# Altium footprint library amirlib.PcbLib: 456 footprints (part 4 of 29)
Each footprint in its own frame and in the unit in brackets; x right, y up, seen from the top. Pads: shape width x height; smd on the part's side, far side on the other; paste and mask are expansions set on the pad; w line width, h text height; cw(c..) or ccw(c..) is an arc to the next point about the centre after c.
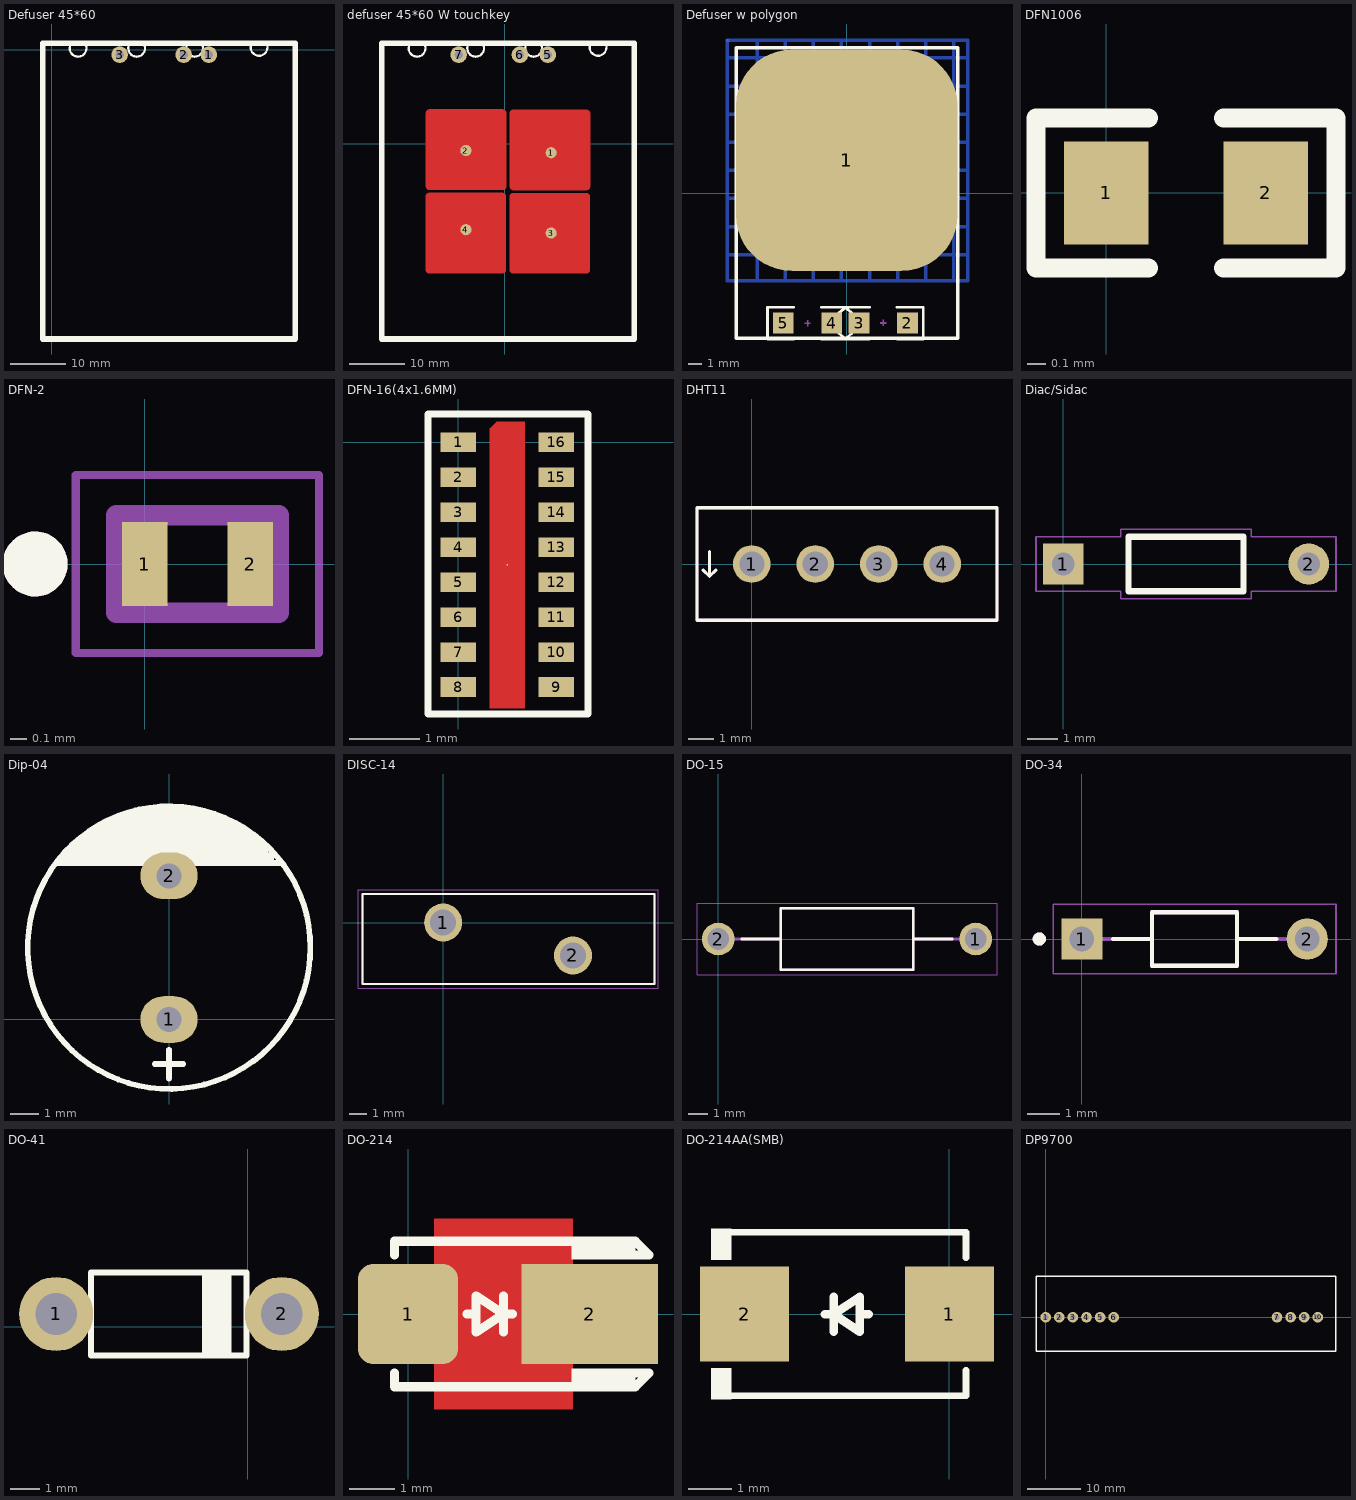
[diagram p3: the footprints below, top view; thin cyan lines are the x and y axes]

## Defuser 45*60 [mm]
pads (3):
  round 3 hole 1.5 square mask+0: 1(28.2,-0.9) 2(23.675,-0.9) 3(12.2,-0.9)
Top Overlay:
  lines w0.4: 3.29,0.6 ccw(c4.745,0.236) 6.2,0.6 ; 13.79,0.6 ccw(c15.245,0.236) 16.7,0.6 ; 24.19,0.6 ccw(c25.645,0.236) 27.1,0.6 ; 35.745,0.764 ccw(c37.2,0.4) 38.655,0.764
  lines w1: -1.6,1.1 -1.6,-51.9 43.4,-51.9 ; -1.3,1.1 43.7,1.1 43.7,-51.9
3D body: height 3, standoff 0, extent -1.951,-52.228 44.35,1.775

## defuser 45*60 W touchkey [mm]
pads (7):
  round 2 smd mask+0: 1(8.3,-1.6) 2(-7,-1.2) 3(8.3,-16) 4(-7,-15.4)
  round 3 hole 1.5 square mask+0: 5(7.7,16) 6(2.7,16) 7(-8.3,16)
Top Layer:
  region: 14.9,-9.183 1.133,-9.183 1.133,-22.899 14.9,-22.899
  region: 14.944,5.772 1.178,5.772 1.178,-7.944 14.944,-7.944
  region: -0.144,-9.138 -13.911,-9.138 -13.911,-22.854 -0.144,-22.854
  region: -0.1,5.816 -13.867,5.816 -13.867,-7.9 -0.1,-7.9
  lines w0.5: -14.017,-22.502 ccw(c-13.517,-22.502) -13.517,-23.002 -0.517,-23.002 ccw(c-0.517,-22.502) -0.017,-22.502 -0.017,-9.502 ccw(c-0.517,-9.502) -0.517,-9.002 -13.517,-9.002 ccw(c-13.517,-9.502) -14.017,-9.502 -14.017,-22.502 ; -13.973,-7.547 ccw(c-13.473,-7.547) -13.473,-8.047 -0.473,-8.047 ccw(c-0.473,-7.547) 0.027,-7.547 0.027,5.453 ccw(c-0.473,5.453) -0.473,5.953 -13.473,5.953 ccw(c-13.473,5.453) -13.973,5.453 -13.973,-7.547 ; 1.027,-22.547 ccw(c1.527,-22.547) 1.527,-23.047 14.527,-23.047 ccw(c14.527,-22.547) 15.027,-22.547 15.027,-9.547 ccw(c14.527,-9.547) 14.527,-9.047 1.527,-9.047 ccw(c1.527,-9.547) 1.027,-9.547 1.027,-22.547 ; 1.072,-7.591 ccw(c1.572,-7.591) 1.572,-8.091 14.572,-8.091 ccw(c14.572,-7.591) 15.072,-7.591 15.072,5.409 ccw(c14.572,5.409) 14.572,5.909 1.572,5.909 ccw(c1.572,5.409) 1.072,5.409 1.072,-7.591
Top Overlay:
  lines w0.4: -17.21,17.5 ccw(c-15.755,17.136) -14.3,17.5 ; -6.71,17.5 ccw(c-5.255,17.136) -3.8,17.5 ; 3.69,17.5 ccw(c5.145,17.136) 6.6,17.5 ; 15.245,17.664 ccw(c16.7,17.3) 18.155,17.664
  lines w1: -22.1,18 -22.1,-35 22.9,-35 ; -21.8,18 23.2,18 23.2,-35
3D body: height 3, standoff 0, extent -22.451,-35.328 23.85,18.675

## Defuser w polygon [mm]
pads (6):
  rrect50% 16x16 smd: 1(-0.012,2.375)
  rect 1.5x1.5 smd: 2(4.375,-9.4) 3(0.875,-9.4) 4(-1.1,-9.4) 5(-4.6,-9.4)
  round 0.2 smd far side mask+0: 6(-8.64,11.046)
Bottom Layer:
  lines w0.254: -8.64,-4.448 8.749,-4.448 ; -8.64,-2.416 8.749,-2.416 ; -8.64,-0.384 8.749,-0.384 ; -8.64,1.648 8.749,1.648 ; -8.64,3.68 8.749,3.68 ; -8.64,5.712 8.749,5.712 ; -8.64,7.744 8.749,7.744 ; -8.64,9.776 8.749,9.776 ; -6.491,-6.342 -6.491,11.046 ; -4.459,-6.342 -4.459,11.046 ; -2.427,-6.342 -2.427,11.046 ; -0.395,-6.342 -0.395,11.046 ; 1.637,-6.342 1.637,11.046 ; 3.669,-6.342 3.669,11.046 ; 5.701,-6.342 5.701,11.046 ; 7.733,-6.342 7.733,11.046 ; -8.64,-6.342 8.749,-6.342 8.749,11.046 -8.64,11.046 -8.64,-6.342
Top Overlay:
  lines w0.2: -3.85,-10.55 -5.75,-10.55 -5.75,-8.25 -3.85,-8.25 ; -1.85,-10.55 -0.15,-10.55 0.35,-10.15 0.35,-8.65 -0.15,-8.25 -1.85,-8.25 ; 1.625,-10.55 -0.075,-10.55 -0.575,-10.15 -0.575,-8.65 -0.075,-8.25 1.625,-8.25 ; 3.625,-10.55 5.525,-10.55 5.525,-8.25 3.625,-8.25
  lines w0.254: -8,10.5 -8,10.5 ; -8,10.5 -8,-10.5 8,-10.5 8,10.5 -8,10.5
Mechanical 1:
  lines w0.1: -3.05,-9.425 -2.65,-9.425 ; -3.05,-9.4 -2.65,-9.4 ; -2.85,-9.625 -2.85,-9.225 ; -2.85,-9.6 -2.85,-9.2 ; 2.425,-9.4 2.825,-9.4 ; 2.425,-9.375 2.825,-9.375 ; 2.625,-9.6 2.625,-9.2 ; 2.625,-9.575 2.625,-9.175
3D body "User Library-led_1206.STEP": height 1.1, standoff 0, extent -4.46,-10.2 -1.24,-8.6
3D body "SW3dPS-LED_SMD_SML010L_Red.STEP": height 1.36, standoff 0.01, extent 0.975,-10.088 4.275,-8.638

## DFN1006 [mm]
pads (2):
  rect 0.45x0.55 smd paste+0 mask+0.051: 1(0,0) 2(0.85,0)
Top Overlay:
  lines w0.102: 0.225,-0.4 -0.375,-0.4 -0.375,0.2 -0.375,0.4 0.225,0.4 ; 0.625,-0.4 1.225,-0.4 1.225,0.2 1.225,0.4 0.625,0.4
Mechanical 15:
  lines w0.003: 0.571,0.441 0.571,0.442
3D body "BAT54LP-7B.STEP": height 0.53, standoff 0, extent -0.056,-0.3 0.944,0.3

## DFN-2 [mm]
pads (2):
  rect 0.28x0.52 smd: 1(0,0) 2(0.65,0)
Top Overlay:
  circle w0.2: c-0.675,0 r0.1
Mechanical 13:
  circle w0.2: c-0.675,0 r0.1
  lines w0.127: -0.175,-0.3 -0.175,0.3 0.825,0.3 0.825,-0.3 -0.175,-0.3
Mechanical 15:
  lines w0.05: -0.425,-0.55 -0.425,0.55 1.075,0.55 1.075,-0.55 -0.425,-0.55
3D body "step_temp.STEP": height 0.4, standoff 0, extent -0.181,-0.312 0.831,0.312

## DFN-16(4x1.6MM) [mm]
pads (17):
  rect 0.51x0.28 smd paste+0 mask+0.102: 1(0,0) 2(0,-0.5) 3(0,-1) 4(0,-1.5) 5(0,-2) 6(0,-2.5) 7(0,-3) 8(0,-3.5) 9(1.4,-3.5) 10(1.4,-3) 11(1.4,-2.5) 12(1.4,-2) 13(1.4,-1.5) 14(1.4,-1) 15(1.4,-0.5) 16(1.4,0)
  round 0.025 smd: 17(0.7,-1.753)
Top Layer:
  region: 0.45,-3.803 0.95,-3.803 0.95,0.297 0.55,0.297 0.45,0.197
Top Overlay:
  lines w0.1: -0.432,-3.886 1.854,-3.886 1.854,0.406 -0.432,0.406 -0.432,-3.886
3D body "DFN16, 4x1.6, 0.5P.step": height 0.6, standoff 0, extent -0.139,-3.753 1.511,0.247

## DHT11 [mm]
pads (4):
  round 1.508 hole 1: 1(0,0) 2(2.54,0) 3(5.08,0) 4(7.62,0)
Top Overlay:
  lines w0.127: -1.69,0.5 -1.69,-0.5 ; -1.44,-0.25 -1.69,-0.5 ; -1.69,-0.5 -1.94,-0.25 -1.69,-0.5 ; -2.19,-2.25 9.81,-2.25 9.81,2.25 -2.19,2.25 -2.19,-2.25
Mechanical 13:
  lines w0.127: -2.19,-2.25 9.81,-2.25 9.81,2.25 -2.19,2.25 -2.19,-2.25
Mechanical 15:
  lines w0.127: -2.19,-2.25 9.81,-2.25 9.81,2.25 -2.19,2.25 -2.19,-2.25
3D body "step_temp.STEP": height 16, standoff -7.7, extent -2.44,-3 10.06,3

## Diac/Sidac [mm]
pads (2):
  rect 1.35x1.35 hole 0.75: 1(0,0)
  round 1.35 hole 0.75: 2(8.1,0)
Top Overlay:
  lines w0.2: 2.15,-0.9 5.95,-0.9 5.95,0.9 2.15,0.9 2.15,-0.9
Mechanical 15:
  lines w0.05: -0.9,-0.9 -0.9,0.9 1.9,0.9 1.9,1.15 6.2,1.15 6.2,0.9 9,0.9 9,-0.9 6.2,-0.9 6.2,-1.15 1.9,-1.15 1.9,-0.9 -0.9,-0.9
3D body "CircuitWorks-RESISTOR 7_62MM DIP.STEP": height 2, standoff -2, extent 0.014,-0.965 8.114,1.035

## Dip-04 [mil]
pads (2):
  oval 80x65 hole 35: 1(0,0) 2(0,200)
Top Overlay:
  circle w7.87: c0,100 r196.85
  region: -74.62,277.83 -74.62,217.98 71.44,217.98 71.44,277.83
  lines w7.87: -155.72,217.98 153.72,217.98 ; -146.67,217.98 -146.67,227.83 ; -141.16,217.98 -141.16,234.13 ; -134.46,217.98 -134.46,240.82 ; -127.38,217.98 -127.38,247.12 ; -119.9,217.98 -119.9,252.63 ; -112.42,217.98 -112.42,258.14 ; -105.72,217.98 -105.33,263.26 ; -98.64,217.98 -98.64,266.8 ; -91.94,217.98 -91.94,270.35 ; -84.86,217.98 -84.86,273.89 ; -77.77,217.98 -77.77,275.07 ; -74.62,277.83 71.44,277.83 ; -63,283.91 62,283.91 ; -47,290.91 46,290.91 ; -20,-62.13 20,-62.13 ; 0,-82.13 0,-42.13 ; 73.02,217.98 73.02,277.83 ; 80.5,217.98 80.5,274.68 ; 87.19,217.98 87.19,271.53 ; 93.88,217.98 93.88,267.98 ; 100.57,217.98 100.57,264.05 ; 107.66,217.98 107.66,259.72 ; 114.35,217.98 114.35,255.39 ; 121.05,217.98 121.05,250.27 ; 127.35,244.76 127.74,244.36 127.74,217.98 ; 134.43,238.46 134.83,238.06 134.83,217.98 ; 142.31,217.98 142.31,230.98
3D body "SW3dPS-Cap electro 10x12.5x5.0mm.STEP": height 402.57, standoff 6.87, extent -631.89,-104.94 17.83,290.38

## DISC-14 [mm]
pads (2):
  round 2.2 hole 1.5: 1(0,0) 2(7.5,-1.9)
Top Overlay:
  lines w0.127: -4.674,-3.55 -4.674,1.65 12.217,1.65 12.217,-3.55 -4.674,-3.55
Mechanical 13:
  lines w0.127: -4.674,-3.55 12.217,-3.55 12.217,1.65 -4.674,1.65 -4.674,-3.55
Mechanical 15:
  lines w0.05: -4.928,-3.8 12.421,-3.8 12.421,1.9 -4.928,1.9 -4.928,-3.8
3D body "step_temp.STEP": height 20, standoff -20, extent -4.5,-3.15 12,1.25

## DO-15 [mm]
pads (2):
  round 1.65 hole 1.1: 1(13,0) 2(0,0)
Top Overlay:
  lines w0.127: 1.18,0 3.15,0 ; 11.82,0 9.85,0 ; 3.15,0 3.15,-1.55 9.85,-1.55 9.85,0 ; 3.15,0 3.15,1.55 9.85,1.55 9.85,0
Mechanical 13:
  lines w0.127: 0,0 3.15,0 ; 13,0 9.85,0 ; 3.15,0 3.15,-1.55 9.85,-1.55 9.85,0 ; 3.15,0 3.15,1.55 9.85,1.55 9.85,0
Mechanical 15:
  lines w0.05: -1.075,-1.8 14.075,-1.8 14.075,1.8 -1.075,1.8 -1.075,-1.8
3D body "step_temp.STEP": height 3.6, standoff -20.45, extent -0.393,-1.8 13.393,1.8

## DO-34 [mm]
pads (2):
  rect 1.258x1.258 / inner round 1.258 / far side rect 1.258x1.258 hole 0.75: 1(0,0)
  round 1.258 hole 0.75: 2(6.89,0)
Top Overlay:
  circle w0.2: c-1.305,0 r0.1
  lines w0.127: 0.949,0 2.145,0 ; 5.941,0 4.745,0 ; 2.145,0 2.145,0.817 4.745,0.817 4.745,0 ; 2.145,0 2.145,-0.817 4.745,-0.817 4.745,0
Mechanical 13:
  circle w0.2: c-1.305,0 r0.1
  lines w0.127: 0,0 2.145,0 ; 6.89,0 4.745,0 ; 2.145,0 2.145,0.817 4.745,0.817 4.745,0 ; 2.145,0 2.145,-0.817 4.745,-0.817 4.745,0
Mechanical 15:
  lines w0.05: -0.879,-1.068 -0.879,1.068 7.769,1.068 7.769,-1.068 -0.879,-1.068
3D body "MTZJ15SA R0G.STEP": height 2, standoff -27.3, extent -0.258,-0.993 7.058,0.993

## DO-41 [mm]
pads (2):
  round 2.5 hole 1.4: 1(-6.47,0.425) 2(1.15,0.425)
Top Overlay:
  rectangle: -1.54,-0.972 -0.552,1.822
  lines w0.2: -5.29,-0.972 -5.29,1.822 -0.04,1.822 -0.04,-0.972 -5.29,-0.972
3D body "1N4007.STEP": height 3.33, standoff -1, extent -6.876,-0.908 1.531,1.759

## DO-214 [mm]
pads (2):
  rrect30% 2.2x2.2 smd: 1(0,0)
  rect 3x2.2 smd: 2(4,0)
Top Layer:
  pour cut-out: 0.576,2.1 0.576,-2.1 3.624,-2.1 3.624,2.1
Top Overlay:
  rectangle: 3.6,-1.6 5,-1.2
  rectangle: 3.6,1.2 5,1.6
  lines w0.2: -0.3,-1.3 -0.3,-1.6 5,-1.6 5.3,-1.3 4.5,-1.3 4.5,-1.6 ; -0.3,1.3 -0.3,1.6 5,1.6 5.3,1.3 4.5,1.3 4.5,1.6 ; 1.3,0 1.5,0 ; 2.1,-0.4 2.1,0.4 ; 2.3,0 2.1,0 ; 2.1,0 1.5,-0.4 1.5,0.4 2.1,0
3D body "User Library-DO-221AC.step": height 1.2, standoff 0, extent -0.7,-1.475 4.9,1.475

## DO-214AA(SMB) [mm]
pads (2):
  rect 2.047x2.192 smd paste+0 mask+0.051: 1(0,0) 2(-4.722,0)
Top Overlay:
  region: -5.028,1.962 -5.028,1.249 -5.485,1.249 -5.485,1.962
  region: -5.028,-1.962 -5.028,-1.249 -5.485,-1.249 -5.485,-1.962
  lines w0.152: -5.104,-1.886 0.383,-1.886 0.383,-1.299 ; -5.104,1.886 0.383,1.886 0.383,1.299
  lines w0.2: -2.867,-0.006 -2.667,-0.006 ; -2.667,-0.406 -2.667,0.394 ; -2.067,-0.006 -1.867,-0.006 ; -2.667,-0.006 -2.067,0.394 -2.067,-0.406 -2.667,-0.006
3D body "User Library-DIOM5539X24.STEP": height 2.45, standoff 0.03, extent -5.112,-1.975 0.388,1.925

## DP9700 [mm]
pads (10):
  round 2 hole 1: 1(0,0) 2(2.54,0) 3(5.08,0) 4(7.62,0) 5(10.16,0) 6(12.7,0) 7(43.18,0) 8(45.72,0) 9(48.26,0) 10(50.8,0)
Top Overlay:
  lines w0.254: -1.8,-6.397 -1.8,7.603 54.2,7.603 54.2,-6.397 -1.8,-6.397